# Altium footprint library Tony_.PcbLib: 94 footprints (part 1 of 6)
Each footprint in its own frame and in the unit in brackets; x right, y up, seen from the top. Pads: shape width x height; smd on the part's side, far side on the other; paste and mask are expansions set on the pad; w line width, h text height; cw(c..) or ccw(c..) is an arc to the next point about the centre after c.
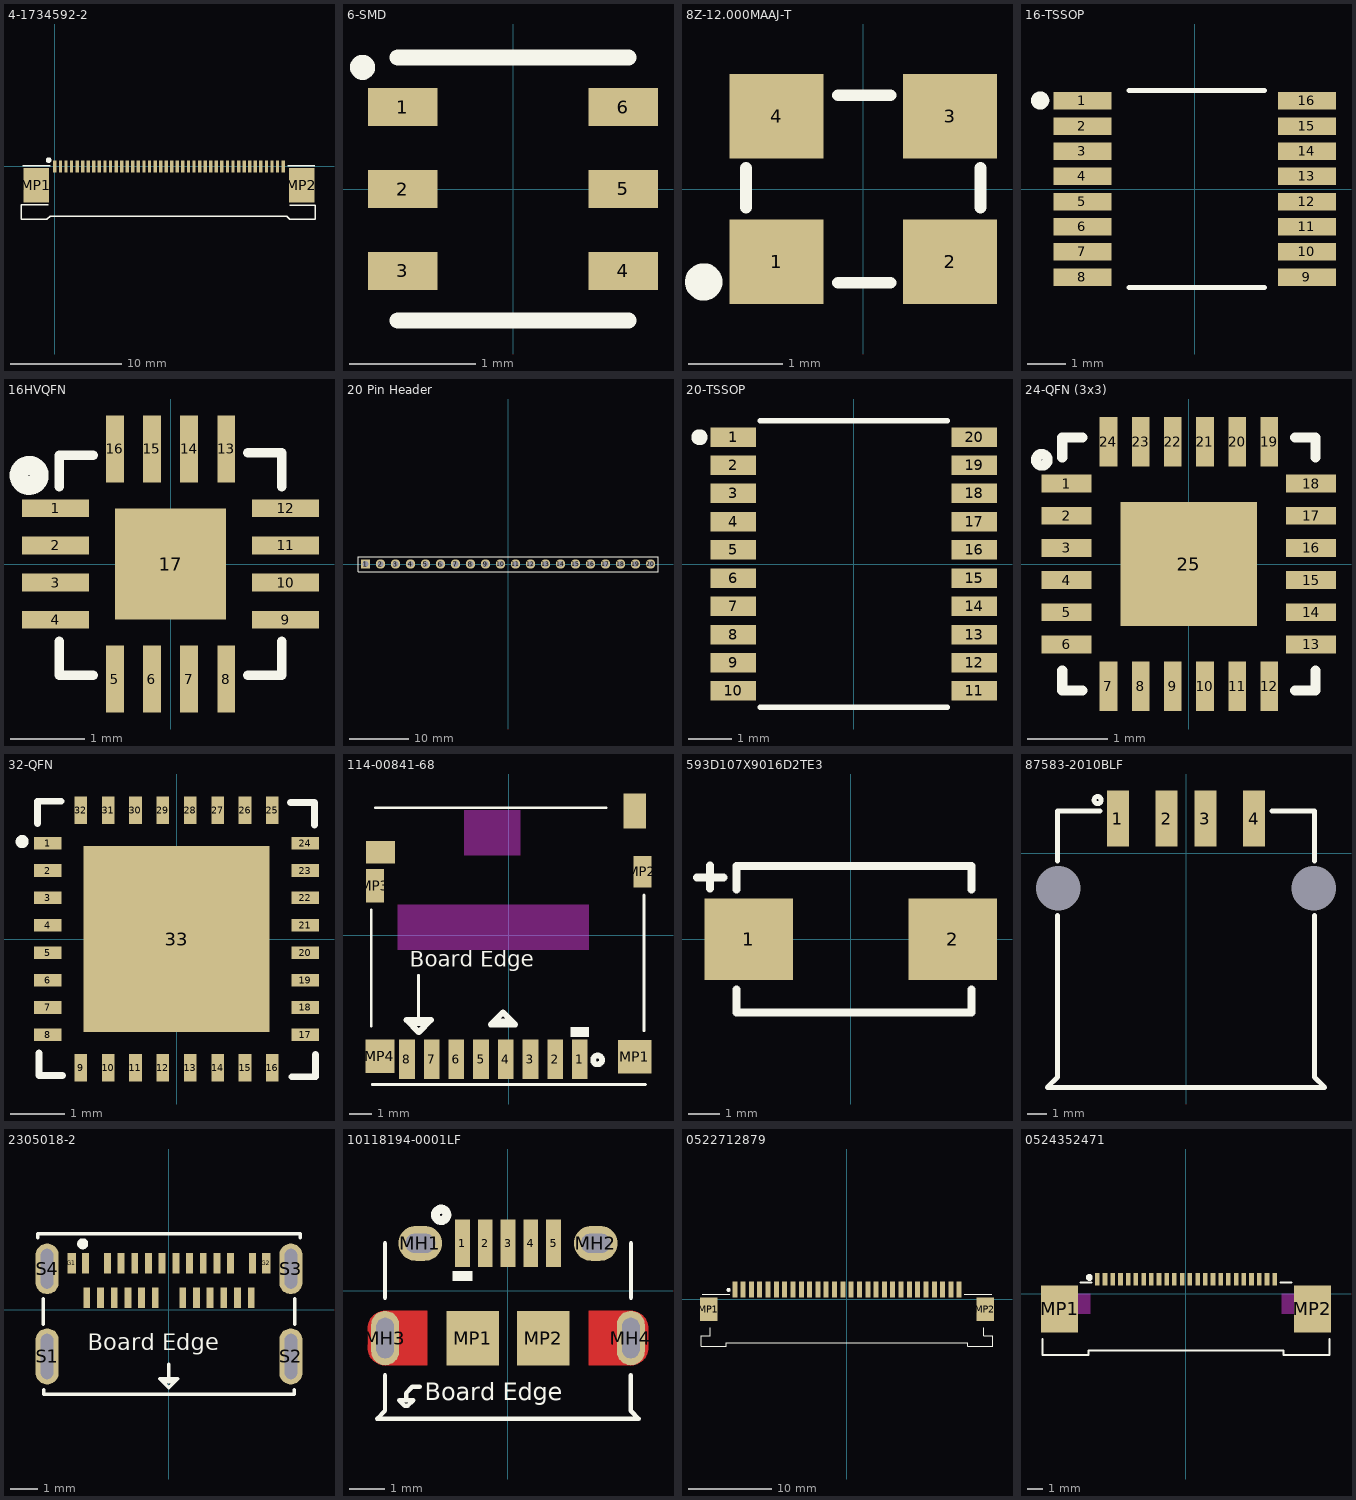
[diagram p0: the footprints below, top view; thin cyan lines are the x and y axes]

## 4-1734592-2 [mm] "CONN FPC BOTTOM 42POS 0.50MM R/A"
pads (44):
  rect 0.3x1.1 smd: 1(0,0) 2(0.5,0) 3(1,0) 4(1.5,0) 5(2,0) 6(2.5,0) 7(3,0) 8(3.5,0) 9(4,0) 10(4.5,0) 11(5,0) 12(5.5,0) 13(6,0) 14(6.5,0) 15(7,0) 16(7.5,0) 17(8,0) 18(8.5,0) 19(9,0) 20(9.5,0) 21(10,0) 22(10.5,0) 23(11,0) 24(11.5,0) 25(12,0) 26(12.5,0) 27(13,0) 28(13.5,0) 29(14,0) 30(14.5,0) 31(15,0) 32(15.5,0) 33(16,0) 34(16.5,0) 35(17,0) 36(17.5,0) 37(18,0) 38(18.5,0) 39(19,0) 40(19.5,0) 41(20,0) 42(20.5,0)
  rect 2.3x3.1 smd: MP1(-1.67,-1.7) MP2(22.17,-1.7)
Top Overlay:
  circle w0.254: c-0.559,0.559 r0.13
  lines w0.127: -2.871,0.051 -0.406,0.051 ; -0.584,-3.454 -2.997,-3.454 -2.997,-4.75 -0.711,-4.75 -0.432,-4.47 20.82,-4.47 21.099,-4.75 23.385,-4.75 23.385,-3.505 21.082,-3.505 ; 20.93,0.076 23.337,0.076
3D body "c-4-1734592-2-c-3d.stp": height 2.05, standoff 0, extent -2.979,-4.76 23.451,0.35

## 6-SMD [mm]
pads (6):
  rect 0.55x0.3 smd: 1(-0.875,0.65) 2(-0.875,0) 3(-0.875,-0.65) 4(0.875,-0.65) 5(0.875,0) 6(0.875,0.65)
Top Overlay:
  circle w0.127: c-1.194,0.965 r0.036
  lines w0.127: -0.914,-1.041 0.914,-1.041 ; -0.914,1.041 0.914,1.041
3D body "84591VEML6030.stp": height 0.83, standoff -0.04, extent -1,-1 1,1

## 8Z-12.000MAAJ-T [mm]
pads (4):
  rect 1x0.9 smd: 1(-0.925,-0.775) 2(0.925,-0.775) 3(0.925,0.775) 4(-0.925,0.775)
Top Overlay:
  circle w0.254: c-1.702,-0.991 r0.072
  lines w0.127: -1.25,-0.198 -1.25,0.223 -1.25,0 ; -0.27,-1 -0.025,-1 0.289,-1 ; -0.27,1 -0.025,1 0.289,1 ; 1.25,-0.198 1.25,0.223
3D body "User Library-SM2520-4.step": height 0.8, standoff -0.03, extent -1.25,-1 1.25,1

## 16-TSSOP [mm]
pads (16):
  rect 1.5x0.45 smd: 1(-2.9,2.275) 2(-2.9,1.625) 3(-2.9,0.975) 4(-2.9,0.325) 5(-2.9,-0.325) 6(-2.9,-0.975) 7(-2.9,-1.625) 8(-2.9,-2.275) 9(2.9,-2.275) 10(2.9,-1.625) 11(2.9,-0.975) 12(2.9,-0.325) 13(2.9,0.325) 14(2.9,0.975) 15(2.9,1.625) 16(2.9,2.275)
Top Overlay:
  circle w0.254: c-3.988,2.286 r0.108
  lines w0.127: -1.702,-2.54 1.803,-2.54 ; -1.702,2.54 1.803,2.54
3D body "TSC2007IPWR.STEP": height 1.2, standoff 0, extent -3.2,-2.5 3.2,2.5

## 16HVQFN [mm] "IC I/O EXPANDER I2C 8B 16HVQFN"
pads (17):
  rect 0.9x0.24 smd: 1(-1.55,0.75) 2(-1.55,0.25) 3(-1.55,-0.25) 4(-1.55,-0.75) 9(1.55,-0.75) 10(1.55,-0.25) 11(1.55,0.25) 12(1.55,0.75)
  rect 0.24x0.9 smd: 5(-0.75,-1.55) 6(-0.25,-1.55) 7(0.25,-1.55) 8(0.75,-1.55) 13(0.75,1.55) 14(0.25,1.55) 15(-0.25,1.55) 16(-0.75,1.55)
  rect 1.5x1.5 smd: 17(0,0)
Top Overlay:
  circle w0.254: c-1.905,1.194 r0.137
  lines w0.127: -1.499,-1.041 -1.499,-1.499 -1.041,-1.499 ; -1.499,1.041 -1.499,1.463 -1.041,1.463 ; 1.041,-1.499 1.499,-1.499 1.499,-1.041 ; 1.041,1.499 1.499,1.499 1.499,1.041
3D body "User Library-QFN-16.STEP": height 0.9, standoff 0, extent -1.501,-1.501 1.501,1.501

## 20 Pin Header [mm]
pads (20):
  rect 1.6x1.6 hole 1: 1(-24.13,0)
  round 1.6 hole 1: 2(-21.59,0) 3(-19.05,0) 4(-16.51,0) 5(-13.97,0) 6(-11.43,0) 7(-8.89,0) 8(-6.35,0) 9(-3.81,0) 10(-1.27,0) 11(1.27,0) 12(3.81,0) 13(6.35,0) 14(8.89,0) 15(11.43,0) 16(13.97,0) 17(16.51,0) 18(19.05,0) 19(21.59,0) 20(24.13,0)
Top Overlay:
  lines w0.2: -0.025,1.27 25.4,1.27 25.4,-1.27 0,-1.27 -25.4,-1.27 -25.4,1.27 -23.495,1.27 0,1.27
3D body "90120-0140.stp": height 9.75, standoff -2.37, extent -25.4,-1.25 25.4,1.25

## 20-TSSOP [mm]
pads (20):
  rect 1.05x0.45 smd: 1(-2.775,2.925) 2(-2.775,2.275) 3(-2.775,1.625) 4(-2.775,0.975) 5(-2.775,0.325) 6(-2.775,-0.325) 7(-2.775,-0.975) 8(-2.775,-1.625) 9(-2.775,-2.275) 10(-2.775,-2.925) 11(2.775,-2.925) 12(2.775,-2.275) 13(2.775,-1.625) 14(2.775,-0.975) 15(2.775,-0.325) 16(2.775,0.325) 17(2.775,0.975) 18(2.775,1.625) 19(2.775,2.275) 20(2.775,2.925)
Top Overlay:
  circle w0.254: c-3.556,2.921 r0.057
  lines w0.127: -2.159,-3.302 2.159,-3.302 ; -2.159,3.302 2.159,3.302
3D body "User Library-TSSOP-20-2.STEP": height 1.2, standoff 0, extent -3.2,-3.25 3.2,3.25

## 24-QFN (3x3) [mm]
pads (25):
  rect 0.62x0.22 smd: 1(-1.52,1) 2(-1.52,0.6) 3(-1.52,0.2) 4(-1.52,-0.2) 5(-1.52,-0.6) 6(-1.52,-1) 13(1.52,-1) 14(1.52,-0.6) 15(1.52,-0.2) 16(1.52,0.2) 17(1.52,0.6) 18(1.52,1)
  rect 0.22x0.62 smd: 7(-1,-1.52) 8(-0.6,-1.52) 9(-0.2,-1.52) 10(0.2,-1.52) 11(0.6,-1.52) 12(1,-1.52) 19(1,1.52) 20(0.6,1.52) 21(0.2,1.52) 22(-0.2,1.52) 23(-0.6,1.52) 24(-1,1.52)
  rect 1.7x1.54 smd: 25(0,0)
Top Overlay:
  circle w0.127: c-1.829,1.295 r0.072
  lines w0.127: -1.574,-1.324 -1.574,-1.574 -1.324,-1.574 ; -1.574,1.324 -1.574,1.574 -1.324,1.574 ; 1.324,-1.574 1.574,-1.574 1.574,-1.324 ; 1.324,1.574 1.574,1.574 1.574,1.324
Top Paste:
  region: 0.08,-0.08 0.69,-0.08 0.69,-0.611 0.08,-0.611
  region: -0.691,-0.08 -0.08,-0.08 -0.08,-0.611 -0.691,-0.611
  region: 0.08,0.61 0.69,0.61 0.69,0.08 0.08,0.08
  region: -0.691,0.61 -0.08,0.61 -0.08,0.08 -0.691,0.08
3D body "ICM-20948--3DModel-STEP-56544.STEP": height 1.03, standoff -0.02, extent -1.5,-1.501 1.5,1.499

## 32-QFN [mm] "Audio codec"
pads (33):
  rect 0.5x0.23 smd: 1(-2.35,1.75) 2(-2.35,1.25) 3(-2.35,0.75) 4(-2.35,0.25) 5(-2.35,-0.25) 6(-2.35,-0.75) 7(-2.35,-1.25) 8(-2.35,-1.75) 17(2.35,-1.75) 18(2.35,-1.25) 19(2.35,-0.75) 20(2.35,-0.25) 21(2.35,0.25) 22(2.35,0.75) 23(2.35,1.25) 24(2.35,1.75)
  rect 0.23x0.5 smd: 9(-1.75,-2.35) 10(-1.25,-2.35) 11(-0.75,-2.35) 12(-0.25,-2.35) 13(0.25,-2.35) 14(0.75,-2.35) 15(1.25,-2.35) 16(1.75,-2.35) 25(1.75,2.35) 26(1.25,2.35) 27(0.75,2.35) 28(0.25,2.35) 29(-0.25,2.35) 30(-0.75,2.35) 31(-1.25,2.35) 32(-1.75,2.35)
  rect 3.4x3.4 smd: 33(0,0)
Top Overlay:
  circle w0.127: c-2.819,1.778 r0.057
  lines w0.127: -2.54,2.108 -2.54,2.515 -2.108,2.515 ; -2.515,-2.083 -2.515,-2.489 -2.083,-2.489 ; 2.083,2.489 2.515,2.489 2.515,2.083 ; 2.108,-2.515 2.54,-2.515 2.54,-2.108
3D body "User Library-QFN32-1.step": height 0.9, standoff -0.03, extent -2.5,-2.5 2.501,2.5

## 114-00841-68 [mm]
pads (14):
  rect 0.7x1.75 smd: 1(3.174,-5.526) 2(2.074,-5.526) 3(0.974,-5.526) 4(-0.126,-5.526) 5(-1.226,-5.526) 6(-2.326,-5.526) 7(-3.426,-5.526) 8(-4.526,-5.526)
  rect 1x1.55 smd: "#CD Switch"(5.624,5.526)
  rect 1.3x1 smd: "*CD Switch"(-5.7,3.694)
  rect 1.5x1.5 smd: MP1(5.624,-5.424)
  rect 0.8x1.4 smd: MP2(5.954,2.826)
  rect 0.8x1.5 smd: MP3(-5.954,2.196)
  rect 1.3x1.5 smd: MP4(-5.726,-5.399)
Top Overlay:
  circle w0.254: c3.962,-5.563 r0.198
  rectangle: -4.274,-4.058 -3.616,-3.785
  region: 0.025,-3.708 -0.632,-3.708 -0.632,-3.981 0.025,-3.981
  rectangle: 2.752,-4.544 3.591,-4.087
  lines w0.127: -6.112,-4.062 -6.112,1.12 ; -6.071,-6.655 6.096,-6.655 ; -5.934,5.666 4.353,5.666 ; -4.013,-3.683 -4.013,-1.792 ; 6.029,-4.265 6.029,1.78
  lines w0.254: -4.547,-3.785 -4,-4.331 -3.454,-3.785 -4.547,-3.785 ; -0.794,-3.981 -0.248,-3.435 0.298,-3.981 -0.794,-3.981
  text "Board Edge" at -4.394,-1.406 h0.7
Keep-Out Layer:
  region: 3.574,-0.649 -4.926,-0.649 -4.926,1.351 3.574,1.351
  region: 0.524,3.551 -1.976,3.551 -1.976,5.551 0.524,5.551
  region: 0.524,3.551 -1.976,3.551 -1.976,5.551 0.524,5.551
  region: 3.574,-0.649 -4.926,-0.649 -4.926,1.351 3.574,1.351
3D body "1140084168--3DModel-STEP-56544.STEP": height 1.47, standoff -0.03, extent -6.05,-5.916 5.97,5.584

## 593D107X9016D2TE3 [mm]
pads (2):
  rect 2.79x2.57 smd: 1(-3.22,0) 2(3.22,0)
Top Overlay:
  lines w0.254: -4.851,1.956 -4.013,1.956 ; -4.445,1.6 -4.445,2.337 ; -3.607,-1.575 -3.607,-2.311 3.81,-2.311 3.81,-1.575 ; -3.607,1.575 -3.607,2.311 3.81,2.311 3.81,1.575
3D body "593D D-CASE.stp": height 2.88, standoff -0.04, extent -3.493,-2.207 3.696,2.21

## 87583-2010BLF [mm]
pads (6):
  rect 1.12x2.88 smd: 1(-3.5,1.79) 2(-1,1.79) 3(1,1.79) 4(3.5,1.79)
  rect 0x0 hole 2.3 unplated: MH1(-6.57,-1.79) MH2(6.57,-1.79)
Top Overlay:
  circle w0.254: c-4.547,2.743 r0.18
  lines w0.254: -6.604,-3.199 -6.604,-11.506 -7.137,-12.04 7.137,-12.04 6.604,-11.506 6.604,-3.199 ; -6.604,-0.381 -6.604,2.184 -4.42,2.184 ; 4.42,2.184 6.604,2.184 6.604,-0.381
3D body "87583-2010blf.stp": height 7.74, standoff -2.63, extent -7.199,-12.069 7.301,2.814

## 2305018-2 [mm] "CONN RCP USB3.1 TYPEC 24P SMD RA"
pads (30):
  rect 0.25x0.75 smd: A1(-3.05,1.7) A2(-2.25,1.7) A3(-1.75,1.7) A4(-1.25,1.7) A5(-0.75,1.7) A6(-0.25,1.7) A7(0.25,1.7) A8(0.75,1.7) A9(1.25,1.7) A10(1.75,1.7) A11(2.25,1.7) A12(3.05,1.7) B1(3,0.45) B2(2.5,0.45) B3(2,0.45) B4(1.5,0.45) B5(1,0.45) B6(0.5,0.45) B7(-0.5,0.45) B8(-1,0.45) B9(-1.5,0.45) B10(-2,0.45) B11(-2.5,0.45) B12(-3,0.45)
  rect 0.3x0.75 smd: G1(-3.55,1.7) G2(3.55,1.7)
  oval 0.85x2.05 hole 0.45 slot 1.65 at 90 deg: S1(-4.45,-1.7) S2(4.45,-1.7)
  oval 0.85x1.85 hole 0.45 slot 1.45 at 90 deg: S3(4.45,1.5) S4(-4.45,1.5)
Top Overlay:
  circle w0.2: c-3.15,2.413 r0.1
  rectangle: -0.229,-2.68 0.203,-2.515
  lines w0.127: -4.798,2.634 -4.798,2.775 4.798,2.775 4.798,2.634 ; -4.595,-0.52 -4.595,0.403 ; -4.569,-3.075 -4.569,-2.906 ; -4.547,-3.075 4.572,-3.075 ; -0.013,-1.981 -0.013,-2.515 ; 4.569,-3.075 4.569,-2.906 ; 4.595,-0.52 4.595,0.403 ; -0.013,-2.515 -0.343,-2.515 -0.013,-2.845 0.318,-2.515 -0.013,-2.515
  text "Board Edge" at -2.959,-1.476 h0.6
3D body "2305018-2--3DModel-STEP-56544.STEP": height 3.53, standoff -0.53, extent -4.919,-5.856 4.919,2.794

## 10118194-0001LF [mm]
pads (11):
  rect 0.42x1.35 smd: 1(-1.3,1.35) 2(-0.65,1.35) 3(0,1.35) 4(0.65,1.35) 5(1.3,1.35)
  oval 1.25x1 hole 0.55 slot 0.85 at 0 deg: MH1(-2.5,1.35) MH2(2.5,1.35)
  oval 0.8x1.55 hole 0.5 slot 1.15 at 90 deg: MH3(-3.5,-1.35) MH4(3.5,-1.35)
  rect 1.5x1.55 smd: MP1(-1,-1.35) MP2(1,-1.35)
Top Layer:
  region: 192 vertices and 0 holes, not listed, extent -4,-2.125 -2.3,-0.57
  region: 192 vertices and 0 holes, not listed, extent 2.3,-2.13 4,-0.575
Top Overlay:
  circle w0.254: c-1.905,2.163 r0.163
  rectangle: -1.575,0.283 -1.016,0.563
  lines w0.127: -3.505,-2.415 -3.505,-3.415 -3.505,-3.425 -3.734,-3.654 3.723,-3.654 3.495,-3.425 ; -3.505,-0.199 -3.505,1.35 ; -2.521,-2.74 -2.725,-2.74 -2.902,-2.918 -2.902,-3.121 ; 3.495,-3.415 3.495,-2.415 ; 3.505,-0.199 3.505,1.35 ; -2.902,-3.121 -3.106,-3.121 -2.942,-3.285 -2.862,-3.285 -2.699,-3.121 -2.902,-3.121
  text "Board Edge" at -2.373,-3.121 h0.5
3D body: height 0.25, standoff 0, extent -17.089,-0.613 -17.089,-0.613
3D body "10118194-0001LF--3DModel-STEP-56544.STEP": height 2.69, standoff -0.58, extent -4.017,-3.988 4.033,1.542

## 0522712879 [mm]
pads (30):
  rect 0.6x1.9 smd: 1(-13.5,1.175) 2(-12.5,1.175) 3(-11.5,1.175) 4(-10.5,1.175) 5(-9.5,1.175) 6(-8.5,1.175) 7(-7.5,1.175) 8(-6.5,1.175) 9(-5.5,1.175) 10(-4.5,1.175) 11(-3.5,1.175) 12(-2.5,1.175) 13(-1.5,1.175) 14(-0.5,1.175) 15(0.5,1.175) 16(1.5,1.175) 17(2.5,1.175) 18(3.5,1.175) 19(4.5,1.175) 20(5.5,1.175) 21(6.5,1.175) 22(7.5,1.175) 23(8.5,1.175) 24(9.5,1.175) 25(10.5,1.175) 26(11.5,1.175) 27(12.5,1.175) 28(13.5,1.175)
  rect 2.1x2.8 smd: MP1(-16.65,-1.175) MP2(16.65,-1.175)
Top Overlay:
  circle w0.254: c-14.249,1.143 r0.127
  lines w0.127: -17.424,0.61 -14.122,0.61 ; -16.485,-3.404 -16.485,-4.394 -17.526,-4.394 -17.526,-5.639 -14.503,-5.639 -14.503,-5.207 14.503,-5.207 14.503,-5.639 17.526,-5.639 17.526,-4.394 16.485,-4.394 16.485,-3.404 ; 14.122,0.61 17.424,0.61
3D body "522712879.stp": height 3, standoff 0, extent -17.475,-5.578 17.525,1.822

## 0524352471 [mm]
pads (26):
  rect 0.3x0.8 smd: 1(-5.75,0.963) 2(-5.25,0.963) 3(-4.75,0.963) 4(-4.25,0.963) 5(-3.75,0.963) 6(-3.25,0.963) 7(-2.75,0.963) 8(-2.25,0.963) 9(-1.75,0.963) 10(-1.25,0.963) 11(-0.75,0.963) 12(-0.25,0.963) 13(0.25,0.963) 14(0.75,0.963) 15(1.25,0.963) 16(1.75,0.963) 17(2.25,0.963) 18(2.75,0.963) 19(3.25,0.963) 20(3.75,0.963) 21(4.25,0.963) 22(4.75,0.963) 23(5.25,0.963) 24(5.75,0.963)
  rect 2.4x3.05 smd: MP1(-8.2,-0.962) MP2(8.2,-0.962)
Top Overlay:
  circle w0.254: c-6.27,1.067 r0.092
  lines w0.127: -9.296,-2.921 -9.296,-3.962 -6.325,-3.962 -6.325,-3.658 6.325,-3.658 6.325,-3.962 9.296,-3.962 9.296,-2.921 ; -6.854,0.737 -6.118,0.737 ; 6.118,0.737 6.854,0.737
Keep-Out Layer:
  region: -6.2,-1.287 -7,-1.287 -7,0.013 -6.2,0.013
  region: 6.2,-1.287 7,-1.287 7,0.013 6.2,0.013
3D body "524352471.stp": height 2.02, standoff -0.03, extent -9.3,-3.941 9.3,1.259